# Altium footprint library 0603ESDA2-TR2.PcbLib: 3 footprints
Each footprint in its own frame and in the unit in brackets; x right, y up, seen from the top. Pads: shape width x height; smd on the part's side, far side on the other; paste and mask are expansions set on the pad; w line width, h text height; cw(c..) or ccw(c..) is an arc to the next point about the centre after c.
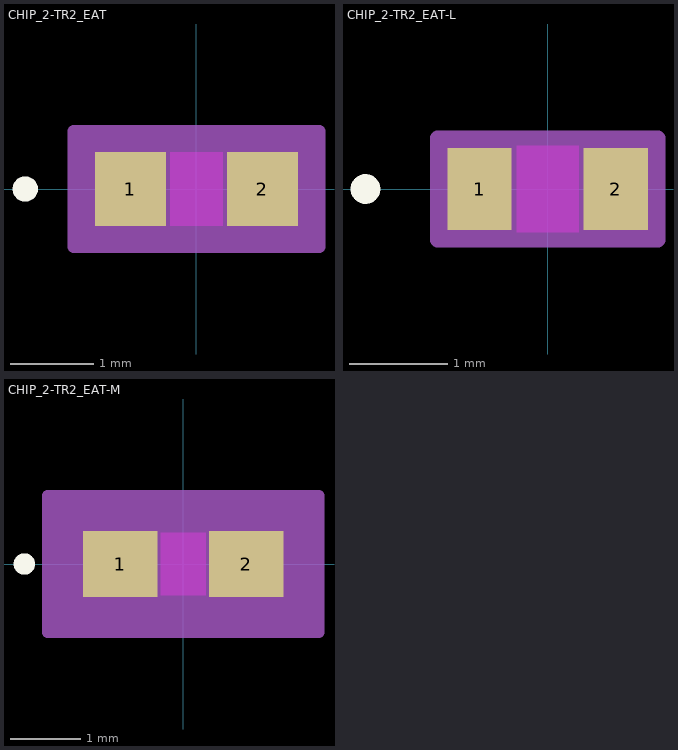
[diagram p0: the footprints below, top view; thin cyan lines are the x and y axes]

## CHIP_2-TR2_EAT [mil]
pads (2):
  rect 33.78x35 smd paste+0 mask+0: 1(-31.39,0) 2(31.39,0)
Top Layer keep-out:
  region: -12.5,-15.5 -12.5,15.5 12.5,15.5 12.5,-15.5
Top Overlay:
  circle w6: c-81.28,0 r3
  text ".Designator" at -137.5,-25 h50
Keep-Out Layer:
  region: -12.5,-17.5 -12.5,17.5 12.5,17.5 12.5,-17.5
Mechanical 13:
  circle w1: c-26.39,0 r3
  lines w1: -34.5,-17.5 -34.5,17.5 ; -34.5,-17.5 -14.5,-17.5 -14.5,17.5 -34.5,17.5 ; -34.5,-17.5 34.5,-17.5 ; -34.5,-17.5 -34.5,17.5 ; -34.5,17.5 34.5,17.5 ; 34.5,-17.5 14.5,-17.5 14.5,17.5 34.5,17.5 ; 34.5,-17.5 34.5,17.5 ; 34.5,-17.5 34.5,17.5
  text ".Designator" at -137.5,-25 h50
Mechanical 15:
  region: 58.28,-27.5 -58.28,-27.5 -58.28,27.5 58.28,27.5
  lines w6: -58.28,-27.5 -58.28,27.5 58.28,27.5 58.28,-27.5 -58.28,-27.5
3D body "CHIP_2-TR2_EAT.step": height 27.99, standoff 0, extent -34.49,-17.48 34.49,17.48

## CHIP_2-TR2_EAT-L [mil]
pads (2):
  rect 25.91x33.03 smd paste+0 mask+0: 1(-27.45,0) 2(27.45,0)
Top Layer keep-out:
  region: -12.5,-15.5 -12.5,15.5 12.5,15.5 12.5,-15.5
Top Overlay:
  circle w6: c-73.41,0 r3
  text ".Designator" at -137.5,-25 h50
Keep-Out Layer:
  region: -12.5,-17.5 -12.5,17.5 12.5,17.5 12.5,-17.5
Mechanical 13:
  circle w1: c-22.45,0 r3
  lines w1: -34.5,-17.5 -34.5,17.5 ; -34.5,-17.5 -14.5,-17.5 -14.5,17.5 -34.5,17.5 ; -34.5,-17.5 34.5,-17.5 ; -34.5,-17.5 -34.5,17.5 ; -34.5,17.5 34.5,17.5 ; 34.5,-17.5 14.5,-17.5 14.5,17.5 34.5,17.5 ; 34.5,-17.5 34.5,17.5 ; 34.5,-17.5 34.5,17.5
  text ".Designator" at -137.5,-25 h50
Mechanical 15:
  region: 44.41,-20.52 -44.41,-20.52 -44.41,20.52 44.41,20.52
  lines w6: -44.41,-20.52 -44.41,20.52 44.41,20.52 44.41,-20.52 -44.41,-20.52
3D body "CHIP_2-TR2_EAT.step": height 27.99, standoff 0, extent -34.49,-17.48 34.49,17.48

## CHIP_2-TR2_EAT-M [mil]
pads (2):
  rect 41.65x36.97 smd paste+0 mask+0: 1(-35.33,0) 2(35.33,0)
Top Layer keep-out:
  region: -12.5,-15.5 -12.5,15.5 12.5,15.5 12.5,-15.5
Top Overlay:
  circle w6: c-89.15,0 r3
  text ".Designator" at -137.5,-25 h50
Keep-Out Layer:
  region: -12.5,-17.5 -12.5,17.5 12.5,17.5 12.5,-17.5
Mechanical 13:
  circle w1: c-30.33,0 r3
  lines w1: -34.5,-17.5 -34.5,17.5 ; -34.5,-17.5 -14.5,-17.5 -14.5,17.5 -34.5,17.5 ; -34.5,-17.5 34.5,-17.5 ; -34.5,-17.5 -34.5,17.5 ; -34.5,17.5 34.5,17.5 ; 34.5,-17.5 14.5,-17.5 14.5,17.5 34.5,17.5 ; 34.5,-17.5 34.5,17.5 ; 34.5,-17.5 34.5,17.5
  text ".Designator" at -137.5,-25 h50
Mechanical 15:
  region: 76.15,-38.48 -76.15,-38.48 -76.15,38.48 76.15,38.48
  lines w6: -76.15,-38.48 -76.15,38.48 76.15,38.48 76.15,-38.48 -76.15,-38.48
3D body "CHIP_2-TR2_EAT.step": height 27.99, standoff 0, extent -34.49,-17.48 34.49,17.48